# Altium schematic symbol library Clema_MOSFET.SchLib: 2 symbols
Pins are listed as number, name and electrical type; pins without a type are passive.

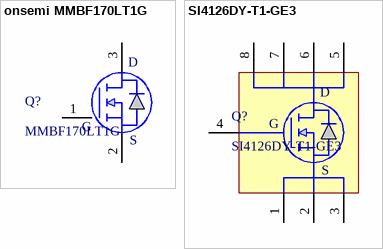
[diagram p0: symbols onsemi MMBF170LT1G to SI4126DY-T1-GE3]

## onsemi MMBF170LT1G
designator Q?, comment MMBF170LT1G
MOSFET N-CH 60V 0.5A SOT-23; Manufacturer: onsemi; Type: SMD; Manufacturer Part Number: MMBF170LT1G; DigiKey Part Number: MMBF170LT1GOSTR-ND; LCSC Part Number: C28871; Mouser Part Number: 863-MMBF170LT1G; Package: SOT-23
footprint MMBF170LT1G_SOT-23_ONS
pins: 1 G, 2 S, 3 D

## SI4126DY-T1-GE3
designator Q?
5W 30V 39A 3.4mΩ@4.5V 1 N-channel N-Channel SOIC-8 Single FETs, MOSFETs RoHS; Manufacturer: VISHAY; Type: SMD; Manufacturer Part Number: SI4126DY-T1-GE3; LCSC Part Number: C143747; Mouser Part Number: 781-SI4126DY-T1-GE3; Package: SOIC-8
footprint SI4126DY-T1-GE3_SOIC-8
pins: 1 S, 2 S, 3 S, 4 G, 5 D, 6 D, 7 D, 8 D